# Altium footprint library 后改2025底板线路板图.PcbLib: 53 footprints (part 4 of 4)
Each footprint in its own frame and in the unit in brackets; x right, y up, seen from the top. Pads: shape width x height; smd on the part's side, far side on the other; paste and mask are expansions set on the pad; w line width, h text height; cw(c..) or ccw(c..) is an arc to the next point about the centre after c.
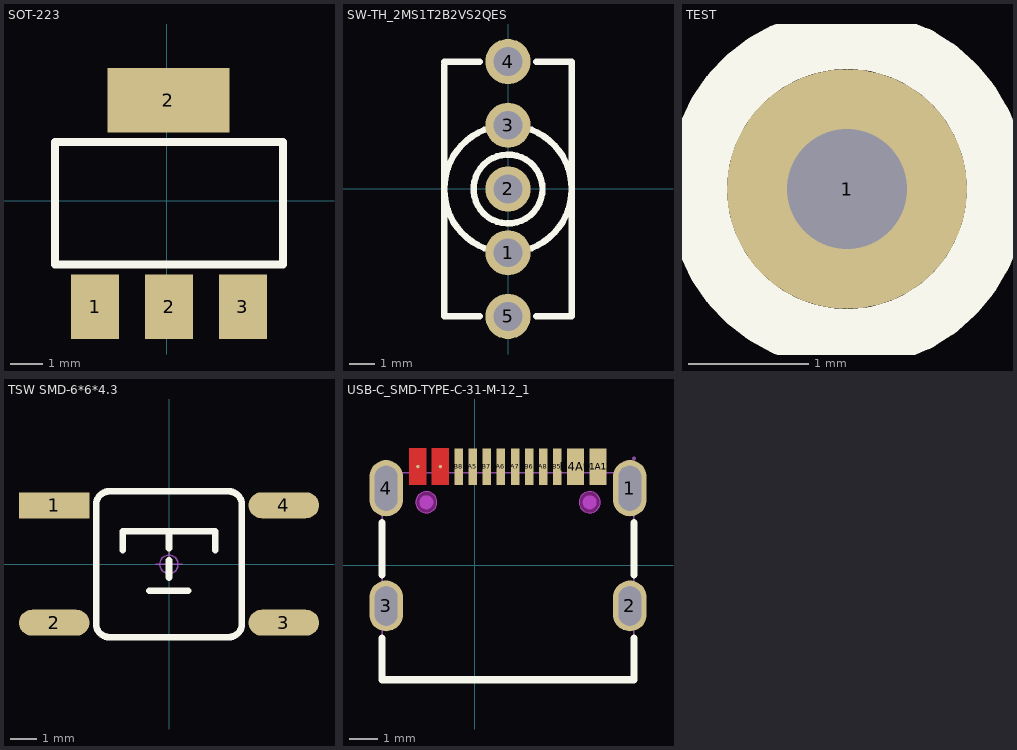
[diagram p3: the footprints below, top view; thin cyan lines are the x and y axes]

## SOT-223 [mil] "封装库来自淘宝卖家 ID：黄晶宝石"
pads (4):
  rect 59x79 smd: 1(-88,-130) 2(2.55,-130) 3(93.1,-130)
  rect 150x79 smd: 2(1.88,123.54)
Top Overlay:
  lines w10: -137.45,-78 142.55,-78 142.55,72 -137.45,72 -137.45,-78
3D body "SOT-223_MP04A.STEP": height 66.93, standoff 0, extent -126.41,-138.72 129.5,135.3

## SW-TH_2MS1T2B2VS2QES [mm]
pads (5):
  round 1.8 hole 1.15: 1(0,-2.54) 2(0,0) 3(0,2.54) 4(0,5.08) 5(0,-5.08)
Top Overlay:
  circle w0.254: c0,0 r1.374
  circle w0.254: c0,0 r2.541
  lines w0.254: -2.54,4.953 -2.54,-5.08 -1.131,-5.08 ; -2.54,5.08 -1.131,5.08 ; 1.131,-5.08 2.54,-5.08 2.54,5.08 1.131,5.08

## TEST [mm]
pads (1):
  round 2 hole 1: 1(0,0)
Top Overlay:
  circle w0.5: c0,0 r1.25
3D body "TEST POINT.STEP": height 4.36, standoff -2.57, extent -1.27,-1.316 1.27,1.316

## TSW SMD-6*6*4.3 [mm] "6*6*4.3mm"
pads (4):
  rect 2.7x1 smd: 1(-4.4,2.261)
  oval 2.7x1 smd: 2(-4.4,-2.239) 3(4.4,-2.239) 4(4.4,2.261)
Top Overlay:
  lines w0.254: -1.778,0.533 -1.778,1.27 1.778,1.27 1.778,0.533 ; -0.762,-1.016 0.737,-1.016 ; 0,-0.508 0,0.152 ; 0,0.61 0,1.27 ; -2.794,-2.286 ccw(c-2.286,-2.286) -2.286,-2.794 2.286,-2.794 ccw(c2.286,-2.286) 2.794,-2.286 2.794,2.286 ccw(c2.286,2.286) 2.286,2.794 -2.286,2.794 ccw(c-2.286,2.286) -2.794,2.286 -2.794,-2.286
Mechanical 15:
  circle w0.05: c0,0 r0.35
  lines w0.05: -0.5,0 0.5,0 ; 0,-0.5 0,0.5
3D body "TSW SMD-6x6x4.3.STEP": height 4.25, standoff 0.05, extent -4.5,-3 4.5,3

## USB-C_SMD-TYPE-C-31-M-12_1 [mm]
pads (16):
  oval 1.2x2 hole 0.8 slot 1.6 at 90 deg: 1(5.513,2.736) 4(-3.137,2.736)
  oval 1.2x1.8 hole 0.8 slot 1.4 at 90 deg: 2(5.513,-1.444) 3(-3.137,-1.444)
  round 0.12 smd: A1B12(-2.012,3.504) A4B9(-1.212,3.504)
  rect 0.3x1.3 smd paste-100 mask+0.051: A5(-0.062,3.504) A6(0.938,3.504) A7(1.438,3.504) A8(2.438,3.504) B5(2.938,3.504) B6(1.938,3.504) B7(0.438,3.504) B8(-0.562,3.504)
  rect 0.6x1.3 smd paste-100 mask+0.051: B1A12(4.388,3.504) B4A9(3.588,3.504)
Top Layer:
  region: -0.912,2.854 -1.212,2.854 -1.512,2.854 -1.512,4.154 -1.212,4.154 -0.912,4.154
  region: -1.712,2.854 -2.012,2.854 -2.312,2.854 -2.312,4.154 -2.012,4.154 -1.712,4.154
Top Overlay:
  lines w0.254: -3.281,-2.583 -3.281,-4.064 5.659,-4.064 5.659,-2.582 ; -3.281,-0.346 -3.281,1.517 ; 5.659,-0.346 5.659,1.518
Top Paste:
  drawing of 16 lines, arcs and shapes, not listed
Keep-Out Layer:
  board cut-out: -1.337,2.236 -1.337,2.161 -1.394,2.023 -1.5,1.918 -1.637,1.861 -1.787,1.861 -1.924,1.918 -2.03,2.023 -2.087,2.161 -2.087,2.236 -2.087,2.31 -2.03,2.448 -1.924,2.554 -1.787,2.611 -1.637,2.611 -1.5,2.554 -1.394,2.448 -1.337,2.31
  board cut-out: 4.463,2.236 4.463,2.161 4.406,2.023 4.3,1.918 4.162,1.861 4.013,1.861 3.875,1.918 3.77,2.023 3.713,2.161 3.713,2.236 3.713,2.31 3.77,2.448 3.875,2.554 4.013,2.611 4.162,2.611 4.3,2.554 4.406,2.448 4.463,2.31
Keep-Out Layer:
  circle w0.025: c-1.712,2.236 r0.375
  circle w0.025: c4.088,2.236 r0.375
  region: -1.337,2.236 -1.337,2.161 -1.394,2.023 -1.5,1.918 -1.637,1.861 -1.787,1.861 -1.924,1.918 -2.03,2.023 -2.087,2.161 -2.087,2.236 -2.087,2.31 -2.03,2.448 -1.924,2.554 -1.787,2.611 -1.637,2.611 -1.5,2.554 -1.394,2.448 -1.337,2.31
  region: 4.463,2.236 4.463,2.161 4.406,2.023 4.3,1.918 4.162,1.861 4.013,1.861 3.875,1.918 3.77,2.023 3.713,2.161 3.713,2.236 3.713,2.31 3.77,2.448 3.875,2.554 4.013,2.611 4.162,2.611 4.3,2.554 4.406,2.448 4.463,2.31
Mechanical 1:
  circle w0.025: c-1.712,2.236 r0.375
  circle w0.025: c4.088,2.236 r0.375
Mechanical 6:
  circle w0.25: c4.088,2.236 r0.125
  circle w0.25: c-1.712,2.236 r0.125
Mechanical 15:
  region: -3.287,-1.044 -2.987,-1.044 -2.987,-1.844 -3.287,-1.844
  region: 5.363,-1.044 5.663,-1.044 5.663,-1.844 5.363,-1.844
  region: 5.363,3.286 5.663,3.286 5.663,2.186 5.363,2.186
  region: -3.287,3.286 -2.987,3.286 -2.987,2.186 -3.287,2.186
  region: 4.398,3.786 4.598,3.786 4.598,3.086 4.398,3.086
  region: 4.198,3.786 4.398,3.786 4.398,3.086 4.198,3.086
  region: 2.838,3.786 3.038,3.786 3.038,3.086 2.838,3.086
  region: 2.338,3.786 2.538,3.786 2.538,3.086 2.338,3.086
  region: 1.838,3.786 2.038,3.786 2.038,3.086 1.838,3.086
  region: 1.338,3.786 1.538,3.786 1.538,3.086 1.338,3.086
  region: 0.838,3.786 1.038,3.786 1.038,3.086 0.838,3.086
  region: 0.338,3.786 0.538,3.786 0.538,3.086 0.338,3.086
  region: -0.162,3.786 0.038,3.786 0.038,3.086 -0.162,3.086
  region: -0.662,3.786 -0.462,3.786 -0.462,3.086 -0.662,3.086
  region: 3.598,3.786 3.798,3.786 3.798,3.086 3.598,3.086
  region: 3.398,3.786 3.598,3.786 3.598,3.086 3.398,3.086
  region: -1.222,3.786 -1.022,3.786 -1.022,3.086 -1.222,3.086
  region: -1.422,3.786 -1.222,3.786 -1.222,3.086 -1.422,3.086
  region: -2.022,3.786 -1.822,3.786 -1.822,3.086 -2.022,3.086
  region: -2.222,3.786 -2.022,3.786 -2.022,3.086 -2.222,3.086
  region: 5.723,3.786 5.723,3.761 5.688,3.726 5.638,3.726 5.603,3.761 5.603,3.786 5.603,3.811 5.638,3.846 5.688,3.846 5.723,3.811
  lines w0.051: -3.282,-4.064 -3.282,3.286 5.658,3.286 5.658,-4.064 -3.282,-4.064